# Altium footprint library iMX6 Rex Development Baseboard V1I1_PCB.PcbLib: 77 footprints (part 2 of 5)
Each footprint in its own frame and in the unit in brackets; x right, y up, seen from the top. Pads: shape width x height; smd on the part's side, far side on the other; paste and mask are expansions set on the pad; w line width, h text height; cw(c..) or ccw(c..) is an arc to the next point about the centre after c.
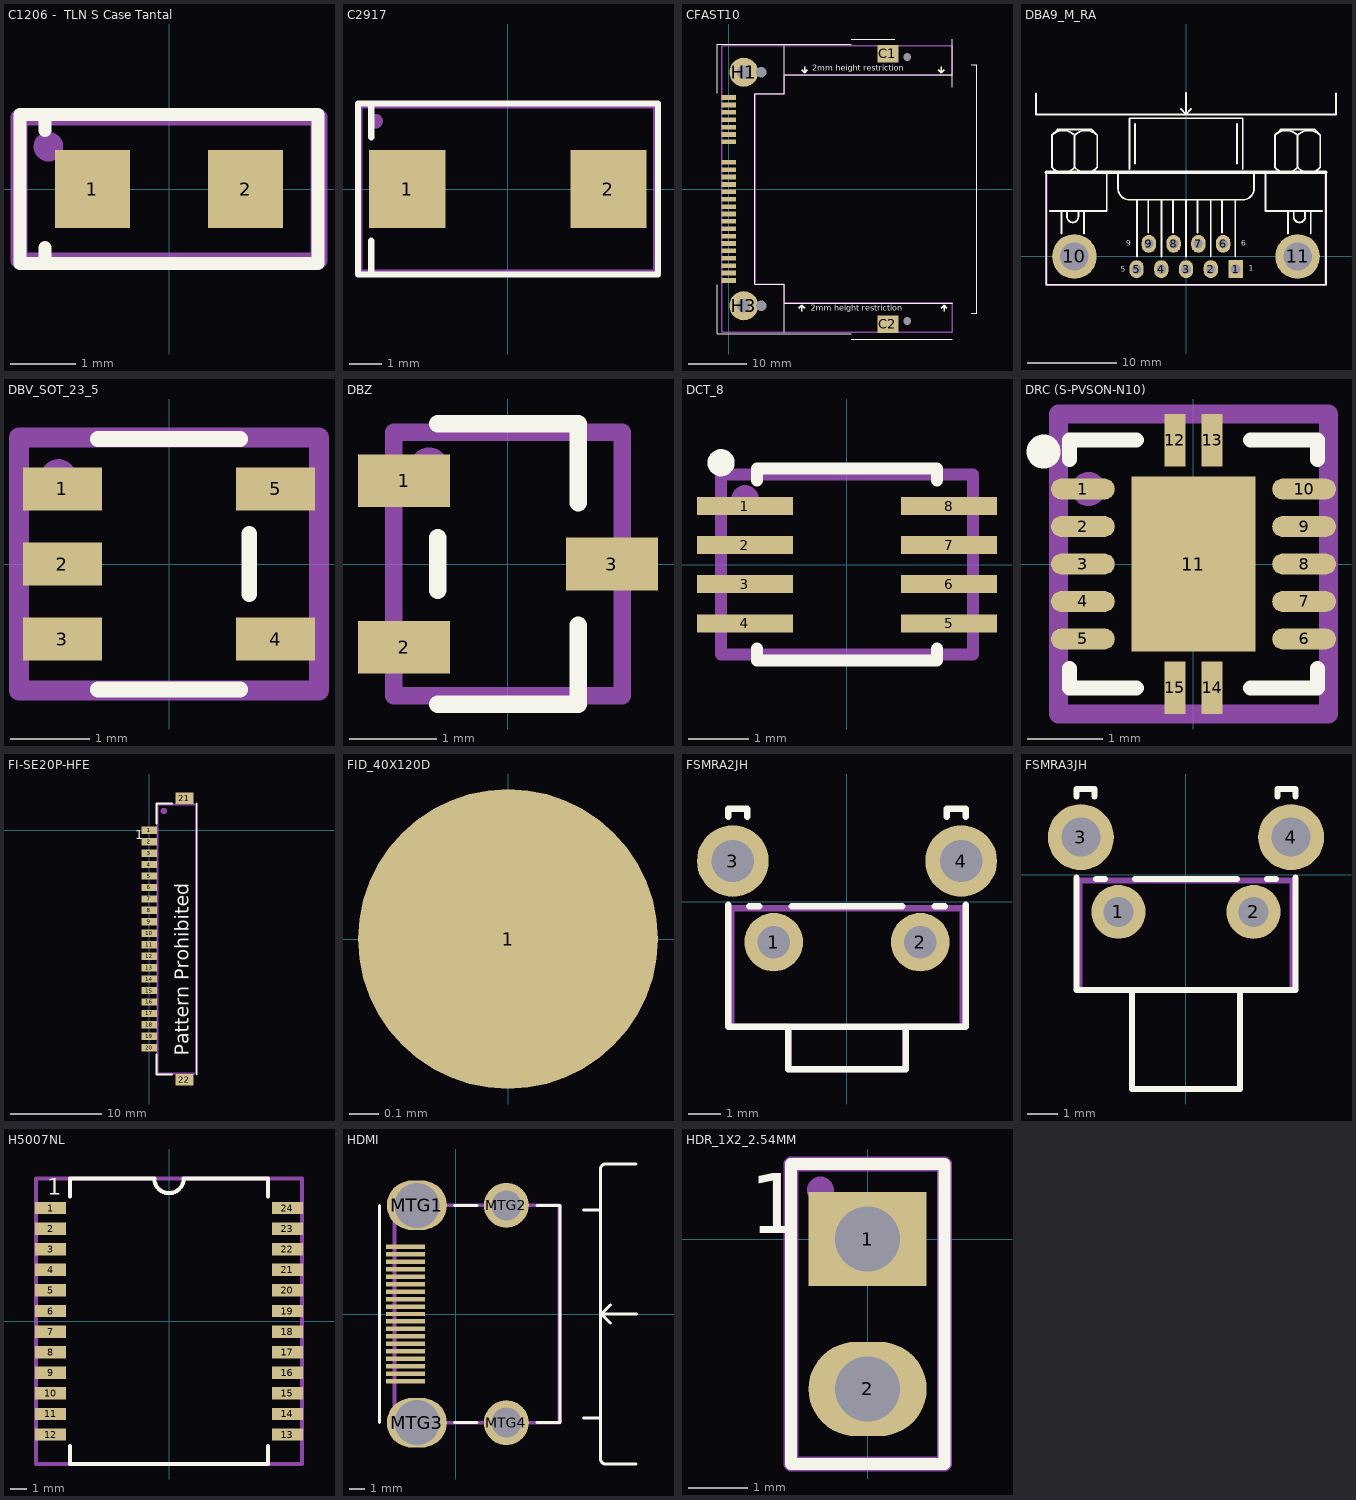
[diagram p1: the footprints below, top view; thin cyan lines are the x and y axes]

## C1206 -  TLN S Case Tantal [mm]
pads (2):
  rect 1.15x1.2 smd: 1(-1.175,0) 2(1.175,0)
Top Overlay:
  lines w0.2: -1.9,-1.143 -1.9,-0.9 ; -1.9,0.9 -1.9,1.143 ; -2.286,-1.143 -2.286,1.143 2.286,1.143 2.286,-1.143 -2.286,-1.143
Mechanical 16:
  circle w0.254: c-1.85,0.65 r0.1
  lines w0.254: -2.3,-1.1 -2.3,1.1 2.3,1.1 2.3,-1.1 -2.3,-1.1
Mechanical 29:
  text ".Designator" at 1.8,0.5 h1
3D body: height 1.21, standoff 1.2, extent -1.6,-0.8 -0.9,0.8
3D body: height 1.2, standoff 0, extent -1.6,-0.8 1.6,0.8

## C2917 [mm]
pads (2):
  rect 2.37x2.43 smd: 1(-3.12,0) 2(3.12,0)
Top Overlay:
  lines w0.2: -4.24,-2.65 -4.24,-1.6 ; -4.24,1.6 -4.24,2.65 ; -4.645,-2.65 -4.645,2.65 4.655,2.65 4.655,-2.65 -4.645,-2.65
Mechanical 16:
  circle w0.254: c-4.1,2.1 r0.1
  lines w0.2: -4.6,-2.6 4.6,-2.6 4.6,2.6 -4.6,2.6 -4.6,-2.6
Mechanical 29:
  text ".Designator" at -2.1,-0.9 h1.52
3D body "CAP_TANT_7343-31.step": height 3.1, standoff 0, extent -3.795,-2.3 3.805,2.3

## CFAST10 [mm]
pads (32):
  rect 3.6x3 smd: C1(27.35,23.3) C2(27.35,-23.3)
  round 5 hole 2.3 mask+0.025: H1(2.55,20.08) H3(2.55,-20.08)
  round 0 hole 1.75 unplated: H2(5.55,20.08) H4(5.55,-20.08)
  round 0 hole 1.35 unplated: H5(30.65,22.7) H6(30.65,-22.7)
  rect 2.5x0.8 smd: PC1(0,4.595) PC2(0,3.325) PC3(0,2.055) PC4(0,0.785) PC5(0,-0.485) PC6(0,-1.755) PC7(0,-3.025) PC8(0,-4.295) PC9(0,-5.565) PC10(0,-6.835) PC11(0,-8.105) PC12(0,-9.375) PC13(0,-10.645) PC14(0,-11.915) PC15(0,-13.185) PC16(0,-14.455) PC17(0,-15.725) S1(0,15.725) S2(0,14.455) S3(0,13.185) S4(0,11.915) S5(0,10.645) S6(0,9.375) S7(0,8.105)
Top Overlay:
  lines w0.2: -2,-16.5 -2,-24.9 21,-24.9 ; -2,16.5 -2,24.9 21,24.9 ; 9.47,-24.6 9.47,-16.4 4.47,-16.4 4.47,16.4 9.47,16.4 9.47,24.6 ; 9.47,-19.615 38.4,-19.615 ; 9.47,19.615 38.4,19.615 ; 21,-25.8 38.4,-25.8 ; 21,25.8 28.5,25.8 ; 38.4,17.5 38.4,25.8 ; 41.7,-21.4 42.6,-21.4 42.6,21.4 41.7,21.4
  lines w0.254: 12,-20.5 12.5,-20 ; 12.5,-21 12.5,-20 ; 12.5,20.5 13,20 ; 13,-20.5 12.5,-20 ; 13,21 13,20 ; 13.5,20.5 13,20 ; 36,20.5 36.5,20 ; 36.5,-20.5 37,-20 ; 36.5,21 36.5,20 ; 37,-21 37,-20 ; 37,20.5 36.5,20 ; 37.5,-20.5 37,-20 ; 36.5,20 36.5,20
  text "2mm height restriction" at 14.1,-20.9 h1
  text "2mm height restriction" at 14.3,20.3 h1
Mechanical 16:
  lines w0.254: -1.2,-24.5 -1.1,-24.6 38.4,-24.6 38.4,-19.6 9.5,-19.6 9.5,-16.4 4.5,-16.4 4.5,16.4 9.4,16.4 9.5,16.5 9.5,19.6 38.4,19.6 38.4,24.6 -1.2,24.6 -1.2,-24.5
Mechanical 29:
  text ".Designator" at 0.9,1 h1.52
3D body "N7G24-AOB2-XX-10-OHT_STP.stp": height 7.69, standoff -0.91, extent -1.03,-24.25 38.2,24.25

## CFAST_LOCKER [mm]
3D body "7E50-C016-00_STP.stp": height 9.7, standoff 1.42, extent -22.415,-19.247 24.815,29.371

## DBA9_M_RA [mm]
pads (11):
  rect 1.6x2 hole 1.09: 1(5.556,-1.418)
  oval 1.6x2 hole 1.09: 2(2.783,-1.418) 3(0.011,-1.418) 4(-2.762,-1.418) 5(-5.535,-1.418) 6(4.159,1.418) 7(1.386,1.418) 8(-1.386,1.418) 9(-4.159,1.418)
  round 5 hole 3.18: 10(-12.499,0) 11(12.499,0)
Top Overlay:
  lines w0.2: -16.8,15.9 -16.8,18.25 ; -0.6,16.55 0,15.95 ; 0,18.3 0,15.95 ; 0.6,16.55 0,15.95 ; 16.8,15.9 16.8,18.25
  lines w0.203: -16.8,15.9 16.8,15.9 ; -15.653,9.418 -15.653,-3.175 15.674,-3.175 15.674,9.418 ; -15.229,5.08 -8.879,5.08 -8.879,9.518 ; -15.02,9.974 ccw(c-13.748,11.247) -12.476,9.974 ; -15.02,13.577 cw(c-13.748,12.305) -12.476,13.577 ; -14.383,9.342 -15.018,9.977 -15.018,13.575 -14.383,14.21 -10.573,14.21 -9.938,13.575 -9.938,9.977 -10.573,9.342 ; -13.959,2.54 -13.959,5.08 ; -13.324,5.08 -13.324,4.445 ccw(c-12.689,4.445) -12.054,4.445 -12.054,5.08 ; -12.48,9.974 ccw(c-11.208,11.247) -9.936,9.974 ; -12.48,13.577 cw(c-11.208,12.305) -9.936,13.577 ; -12.478,9.977 -12.478,13.575 ; -11.419,2.54 -11.419,5.08 ; -7.609,9.418 -7.609,7.62 ccw(c-6.339,7.62) -6.339,6.35 6.361,6.35 ccw(c6.361,7.62) 7.631,7.62 7.631,9.518 ; -6.339,9.765 -6.339,15.48 6.361,15.48 6.361,9.765 ; -5.704,10.4 -5.704,14.845 ; -5.493,0 -5.493,6.35 ; -4.223,2.7 -4.223,6.35 ; -2.741,0 -2.741,6.35 ; -1.471,2.7 -1.471,6.35 ; 0.011,0 0.011,6.35 ; 1.281,2.7 1.281,6.35 ; 2.762,0 2.762,6.35 ; 4.032,2.7 4.032,6.35 ; 5.514,0 5.514,6.35 ; 5.726,10.4 5.726,14.845 ; 8.901,9.418 8.901,5.08 15.251,5.08 ; 9.957,9.974 ccw(c11.229,11.247) 12.501,9.974 ; 9.957,13.577 cw(c11.229,12.305) 12.501,13.577 ; 10.594,9.342 9.959,9.977 9.959,13.575 10.594,14.21 14.404,14.21 15.039,13.575 15.039,9.977 14.404,9.342 ; 11.441,2.54 11.441,5.08 ; 12.076,5.08 12.076,4.445 ccw(c12.711,4.445) 13.346,4.445 13.346,5.08 ; 12.497,9.974 ccw(c13.769,11.247) 15.041,9.974 ; 12.497,13.577 cw(c13.769,12.305) 15.041,13.577 ; 12.499,9.977 12.499,13.575 ; 13.981,2.54 13.981,5.08
  lines w0.4: -15.653,9.418 15.674,9.418
  text "6" at 6.2,1.2 h0.6
  text "1" at 7,-1.6 h0.6
  text "5" at -7.3,-1.7 h0.6
  text "9" at -6.7,1.2 h0.6
Mechanical 16:
  lines w0.254: -15.641,-3.182 15.659,-3.182 15.659,9.418 -15.641,9.418 -15.641,-3.182
Mechanical 29:
  text ".Designator" at -2.1,1.2 h1.52
3D body "c-1734351-1-a-3d.stp": height 12.45, standoff -4.15, extent -15.4,-2.9 15.4,15.5

## DBV_SOT_23_5 [mm]
pads (5):
  rect 1x0.55 smd: 1(-1.35,0.95) 2(-1.35,0) 3(-1.35,-0.95) 4(1.35,-0.95) 5(1.35,0.95)
Top Overlay:
  lines w0.2: -0.9,-1.59 0.9,-1.59 ; -0.9,1.585 0.9,1.585 ; 1.016,-0.381 1.016,0.381
Mechanical 16:
  circle w0.254: c-1.4,1.1 r0.1
  lines w0.254: -1.9,-1.6 1.9,-1.6 1.9,1.6 -1.9,1.6 -1.9,-1.6
Mechanical 29:
  text ".Designator" at -0.5,-0.3 h0.6
3D body: height 1.45, standoff 0, extent -1,-1.69 1.116,1.685
3D body: height 0.5, standoff 0, extent -1.651,0.635 -1.016,1.27
3D body: height 0.5, standoff 0, extent -1.651,-1.27 -1.016,-0.635
3D body: height 0.5, standoff 0, extent -1.651,-0.318 -1.016,0.318
3D body: height 0.5, standoff 0, extent 1.143,0.635 1.778,1.27
3D body: height 0.5, standoff 0, extent 1.143,-1.27 1.778,-0.635

## DBZ [mm]
pads (3):
  rect 1.05x0.6 smd mask+0.07: 1(-1.185,0.95) 2(-1.185,-0.95) 3(1.185,0)
Top Overlay:
  lines w0.2: -0.8,-1.6 0.8,-1.6 0.8,-0.7 ; -0.8,-0.3 -0.8,0.3 ; -0.8,1.6 0.8,1.6 0.8,0.7
Mechanical 16:
  circle w0.254: c-0.9,1.1 r0.1
  lines w0.2: -1.3,-1.5 1.3,-1.5 1.3,1.5 -1.3,1.5 -1.3,-1.5
Mechanical 29:
  text ".Designator" at -0.3,0.7 h0.6
3D body "mf03a.stp": height 0.97, standoff -0.01, extent -1.257,-1.461 1.257,1.46

## DCT_8 [mm]
pads (8):
  rect 1.6x0.3 smd mask+0.07: 1(-1.7,0.975) 2(-1.7,0.325) 3(-1.7,-0.325) 4(-1.7,-0.975) 5(1.7,-0.975) 6(1.7,-0.325) 7(1.7,0.325) 8(1.7,0.975)
Top Overlay:
  circle w0.254: c-2.1,1.7 r0.1
  lines w0.2: -1.5,-1.4 -1.5,-1.6 1.5,-1.6 1.5,-1.4 ; -1.5,1.4 -1.5,1.6 1.5,1.6 1.5,1.4
Mechanical 16:
  circle w0.254: c-1.7,1.1 r0.1
  lines w0.2: -2.1,-1.5 2.1,-1.5 2.1,1.5 -2.1,1.5 -2.1,-1.5
Mechanical 29:
  text ".Designator" at -0.7,-0.5 h0.8
3D body "DCT-8.STEP": height 1.3, standoff 0, extent -2.1,-1.525 2.1,1.525

## DRC (S-PVSON-N10) [mm]
pads (15):
  oval 0.85x0.28 smd mask+0.025: 1(-1.475,1) 2(-1.475,0.5) 3(-1.475,0) 4(-1.475,-0.5) 5(-1.475,-1) 6(1.475,-1) 7(1.475,-0.5) 8(1.475,0) 9(1.475,0.5) 10(1.475,1)
  rect 1.65x2.337 smd paste-1.524 mask+0.025: 11(0,0)
  rect 0.28x0.7 smd mask+0.127: 12(-0.25,1.651) 13(0.25,1.651) 14(0.25,-1.651) 15(-0.25,-1.651)
Top Overlay:
  circle w0.254: c-2,1.5 r0.1
  lines w0.2: -1.651,-1.397 -1.651,-1.651 -0.762,-1.651 ; -1.651,1.397 -1.651,1.651 -0.762,1.651 ; 0.762,-1.651 1.651,-1.651 1.651,-1.397 ; 0.762,1.651 1.651,1.651 1.651,1.397
Top Paste:
  rectangle: -0.763,0.102 -0.102,1.143
  rectangle: -0.763,-1.143 -0.102,-0.102
  rectangle: 0.101,-1.143 0.761,-0.102
  rectangle: 0.101,0.102 0.761,1.143
Mechanical 16:
  circle w0.254: c-1.4,1 r0.1
  lines w0.254: -1.8,-2 1.8,-2 1.8,2 -1.8,2 -1.8,-2
Mechanical 29:
  text ".Designator" at -0.5,0.6 h1
3D body: height 1, standoff 0, extent -1.651,-1.651 1.651,1.651

## FI-SE20P-HFE [mm]
pads (22):
  rect 1.7x0.8 smd: 1(0,0) 2(0,-1.25) 3(0,-2.5) 4(0,-3.75) 5(0,-5) 6(0,-6.25) 7(0,-7.5) 8(0,-8.75) 9(0,-10) 10(0,-11.25) 11(0,-12.5) 12(0,-13.75) 13(0,-15) 14(0,-16.25) 15(0,-17.5) 16(0,-18.75) 17(0,-20) 18(0,-21.25) 19(0,-22.5) 20(0,-23.75)
  rect 2x1.25 smd: 21(3.85,3.5) 22(3.85,-27.25)
Top Overlay:
  lines w0.2: 0.8,-24.45 0.8,-26.65 2.5,-26.65 ; 0.8,0.7 0.8,2.9 2.5,2.9 ; 5.2,-26.65 5.2,2.9
  text "Pattern Prohibited" at 4.3,-24.6 h1.52
  text "1" at -1.5,-1 h1.02
Mechanical 16:
  circle w0.5: c1.6,2.1 r0.1
  lines w0.2: 0.9,-26.55 5.1,-26.55 5.1,2.8 0.9,2.8 0.9,-26.55
Mechanical 29:
  text ".Designator" at 2.2,-10.5 h1.52
3D body "K3D-FI-SE20P-HFE-R1.STEP": height 2.11, standoff 0, extent -0.25,-27.275 5.1,3.475

## FID_40X120D [mil]
pads (1):
  round 40 smd paste-40 mask+40: 1(0,0)

## FSMRA2JH [mm]
pads (4):
  round 1.8 hole 1: 1(-2.25,-1.245) 2(2.25,-1.245)
  round 2.2 hole 1.3: 3(-3.505,1.245) 4(3.505,1.245)
Top Overlay:
  lines w0.2: -3.65,-0.1 -3.65,-3.845 3.65,-3.845 3.65,-0.1 ; -3.65,2.6 -3.65,2.85 -3.055,2.85 -3.055,2.6 ; -3,-0.145 -2.7,-0.145 ; -1.8,-3.845 -1.8,-5.145 1.8,-5.145 1.8,-3.845 ; -1.7,-0.145 1.7,-0.145 ; 2.7,-0.145 3,-0.145 ; 3.055,2.6 3.055,2.85 3.65,2.85 3.65,2.6
Mechanical 16:
  lines w0.2: -3.55,-3.845 -3.55,-0.2 3.55,-0.2 3.55,-3.845 1.8,-3.845 1.8,-5.145 -1.8,-5.145 -1.8,-3.845 -3.55,-3.845
Mechanical 29:
  text ".Designator" at -1.5,-2.5 h1.2
3D body "c-1825027-5-g1-3d.stp": height 7.05, standoff -3.47, extent -4.204,-5.094 4.204,2.767

## FSMRA3JH [mm]
pads (4):
  round 1.8 hole 1: 1(-2.25,-1.245) 2(2.25,-1.245)
  round 2.2 hole 1.3: 3(-3.505,1.245) 4(3.505,1.245)
Top Overlay:
  lines w0.2: -3.65,-0.1 -3.65,-3.845 3.65,-3.845 3.65,-0.1 ; -3.65,2.6 -3.65,2.85 -3.055,2.85 -3.055,2.6 ; -3,-0.145 -2.7,-0.145 ; -1.8,-3.845 -1.8,-7.145 1.8,-7.145 1.8,-3.845 ; -1.7,-0.145 1.7,-0.145 ; 2.7,-0.145 3,-0.145 ; 3.055,2.6 3.055,2.85 3.65,2.85 3.65,2.6
Mechanical 16:
  lines w0.2: -3.55,-3.845 -3.55,-0.2 3.55,-0.2 3.55,-3.845 1.8,-3.845 1.8,-7.145 -1.8,-7.145 -1.8,-3.845 -3.55,-3.845
Mechanical 29:
  text ".Designator" at -1.5,-2.5 h1.2
3D body "c-1825027-8-g1-3d.stp": height 7.05, standoff -3.47, extent -4.204,-7.101 4.204,2.741

## H5007NL [mil]
pads (24):
  rect 75x30 smd: 1(-287.5,275) 2(-287.5,225) 3(-287.5,175) 4(-287.5,125) 5(-287.5,75) 6(-287.5,25) 7(-287.5,-25) 8(-287.5,-75) 9(-287.5,-125) 10(-287.5,-175) 11(-287.5,-225) 12(-287.5,-275) 13(287.5,-275) 14(287.5,-225) 15(287.5,-175) 16(287.5,-125) 17(287.5,-75) 18(287.5,-25) 19(287.5,25) 20(287.5,75) 21(287.5,125) 22(287.5,175) 23(287.5,225) 24(287.5,275)
Top Overlay:
  lines w10: -240.16,-303.15 -240.16,-346.46 240.16,-346.46 240.16,-303.15 ; -240.16,303.15 -240.16,346.46 -37.66,346.46 ; -35.43,346.46 ccw(c0.01,346.46) 35.45,346.46 ; 37.66,346.46 240.16,346.46 240.16,303.15
  text "1" at -295.28,307.09 h40
Mechanical 16:
  circle w10: c-287.4,275.59 r3.94
  lines w10: -322.83,-346.46 322.83,-346.46 322.83,346.46 -322.83,346.46 -322.83,-346.46
Mechanical 29:
  text ".Designator" at -39.37,35.43 h60
3D body: height 216.93, standoff 0, extent -240.16,-346.46 240.16,346.46

## HDMI [mm]
pads (23):
  rect 2.6x0.3 smd mask+0.025: 1(-3.36,4.5) 2(-3.36,4) 3(-3.36,3.5) 4(-3.36,3) 5(-3.36,2.5) 6(-3.36,2) 7(-3.36,1.5) 8(-3.36,1) 9(-3.36,0.5) 10(-3.36,0) 11(-3.36,-0.5) 12(-3.36,-1) 13(-3.36,-1.5) 14(-3.36,-2) 15(-3.36,-2.5) 16(-3.36,-3) 17(-3.36,-3.5) 18(-3.36,-4) 19(-3.36,-4.5)
  oval 4x3.3 hole 3: MTG1(-2.6,7.25) MTG3(-2.6,-7.25)
  round 3 hole 2: MTG2(3.36,7.25) MTG4(3.36,-7.25)
Top Overlay:
  lines w0.2: -5.1,-7.25 -5.1,7.25 ; -0.1,-7.25 1.4,-7.25 ; -0.1,7.25 1.4,7.25 ; 5.4,-7.25 6.9,-7.25 6.95,-7.2 6.95,7.25 ; 5.4,7.25 6.9,7.25 ; 8.5,-6.95 9.65,-6.95 ; 8.5,6.95 9.65,6.95 ; 9.95,10 12,10 ; 10,10 ccw(c9.975,9.675) 9.65,9.7 9.65,-9.7 ccw(c9.975,-9.675) 10,-10 12,-10 ; 10.3,-0.6 9.7,0 ; 10.3,0.6 9.7,0 ; 12.05,0 9.7,0
Mechanical 1:
  text "plastic may go over the board edge" at -6.6,9.6 h0.5
  text "doesnt fit on one place. Bottom" at -6.5,10.8 h0.5
  text "NOTE: Holes are big and connector" at -6.5,12 h0.5
Mechanical 16:
  lines w0.254: -4.1,-7.25 6.9,-7.25 6.9,7.25 -4.1,7.25 -4.1,-7.25
Mechanical 29:
  text ".Designator" at 0.5,2.3 h1.52
3D body "471510001.stp": height 6.28, standoff -2.1, extent -4.2,-7.5 7.95,7.5

## HDR_1X2_2.54MM [mm]
pads (2):
  rect 2x1.6 hole 1.1: 1(0,0)
  oval 2x1.6 hole 1.1: 2(0,-2.54)
Top Overlay:
  lines w0.2: -1.3,-3.81 1.3,-3.81 1.3,1.27 -1.3,1.27 -1.3,-3.81
  text "1" at -2,0.1 h1.02
Mechanical 16:
  circle w0.254: c-0.8,0.83 r0.1
  lines w0.254: -1.3,-3.81 -1.3,1.27 1.3,1.27 1.3,-3.81 -1.3,-3.81
Mechanical 29:
  text ".Designator" at 0.5,-2.7 h1
3D body "77311-118-02lf.stp": height 8.4, standoff -3.1, extent -1.205,-3.62 1.205,1.06